# Altium schematic symbol library ECE362.SchLib: 24 symbols
Pins are listed as number, name and electrical type; pins without a type are passive.

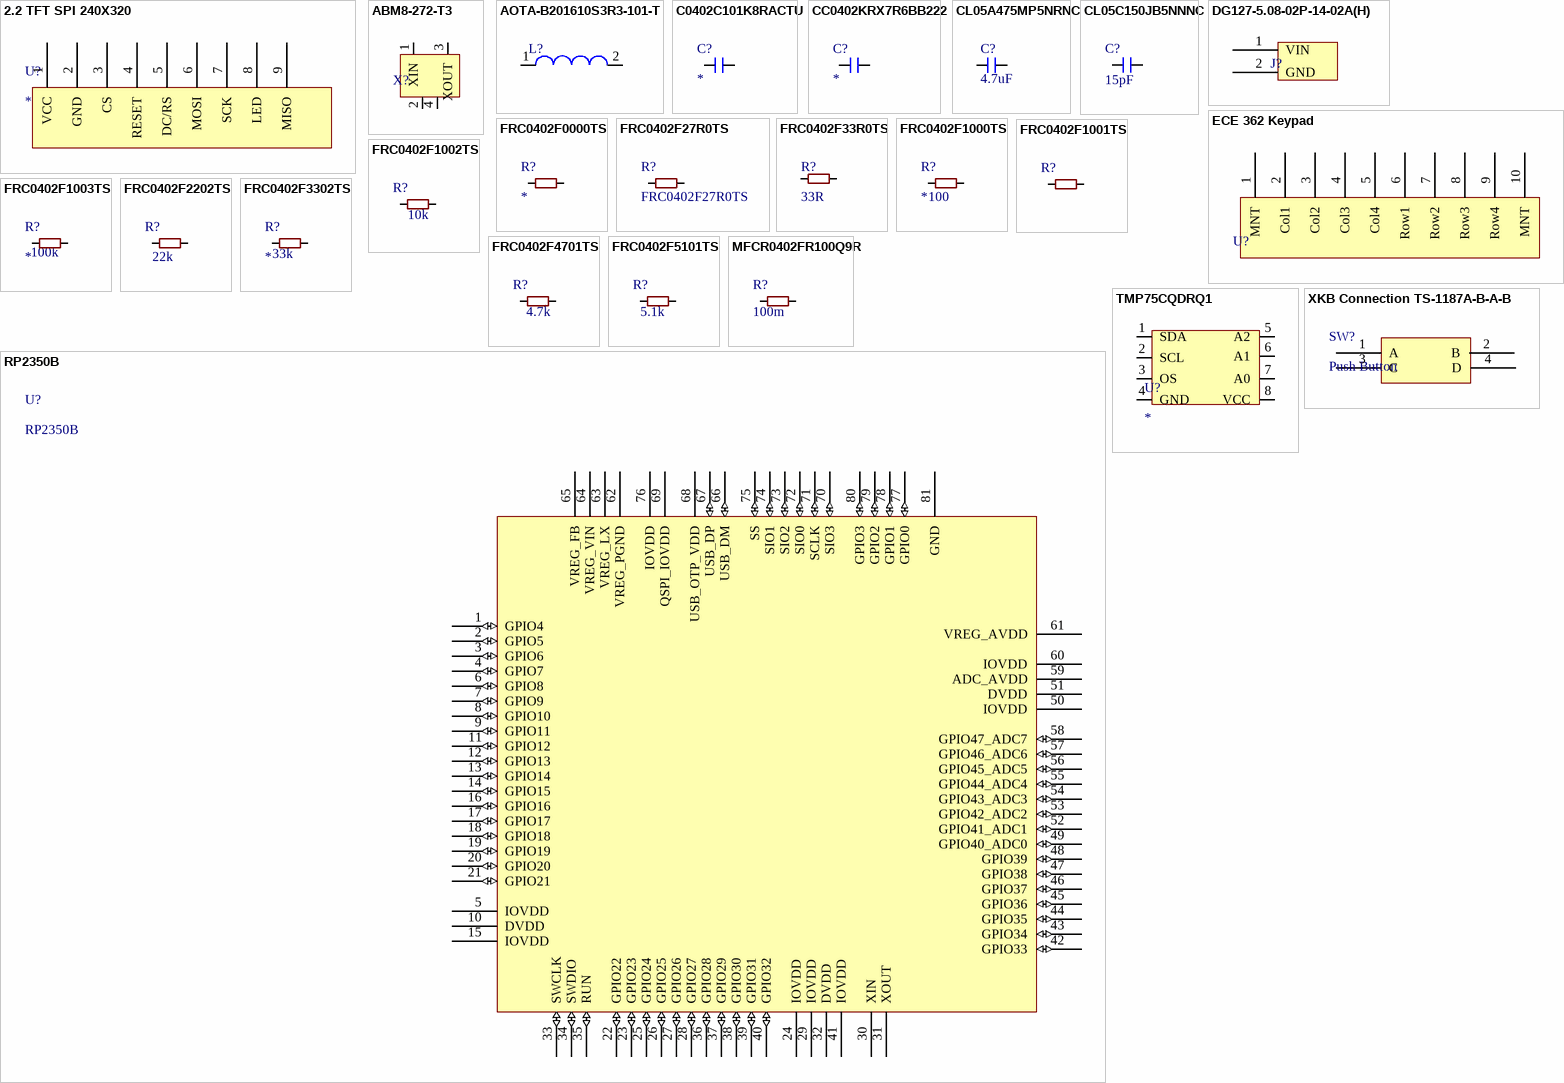
[diagram p0: symbols 2.2 TFT SPI 240X320 to XKB Connection TS-1187A-B-A-B]

## 2.2 TFT SPI 240X320
designator U?
2.2 inch TFT SPI Display; Datasheet: https://www.lcdwiki.com/2.2inch_SPI_Module_ILI9341_SKU:MSP2202#Reference_Materials
footprint TFT 2.2 LCD Display
pins: 1 VCC, 2 GND, 3 CS, 4 RESET, 5 DC/RS, 6 MOSI, 7 SCK, 8 LED, 9 MISO

## ABM8-272-T3
designator X?, comment 12MHz  (value not drawn)
Ultra Miniature Ceramic SMD Crystal, 12MHz, 50 Ohm ESR, +/- 30ppm tolerance, 10pF load capacitance, Recommended for RP2350B; ESR: 50R; Frequency: 12MHz; Tolerance: +/- 30ppm; Load Capacitance: 10pF; LCSC Part #: C20625731
footprint ABRACON ABM8-272-T3 (Ultra Miniature Ceramic SMD Crystal)
pins: 1 XIN, 2 GND, 3 XOUT, 4 GND

## AOTA-B201610S3R3-101-T
designator L?
3.3uH, 0806; Inductance: 3.3uH; LCSC Part #: C42411119; Datasheet: http://lcsc.com/product-detail/C42411119.html
footprint AOTA-B201610S3R3-101-T (3.3uH Inductor for the RP2350)
pins: 1, 2

## C0402C101K8RACTU
designator C?
100pF X7R ±10% 10V 0402 Ceramic Capacitors RoHS; C: 100pF; LCSC Part #: C22401043
footprint 0402 Resistor (0402 Thick Film)
pins: 1, 2

## CC0402KRX7R6BB222
designator C?
CAP CER 2.2nF 10V X7R 0402; C: 2.2nF; LCSC Part #: C541373
footprint 0402 Resistor (0402 Thick Film)
pins: 1, 2

## CL05A475MP5NRNC
designator C?, comment 4.7uF
CAP CER 4.7uF 10V X5R 0402; C: 4.7uF; LCSC Part #: C23733; Datasheet: https://www.lcsc.com/datasheet/C23733.pdf
footprint 0402 Resistor (0402 Thick Film)
pins: 1, 2

## CL05C150JB5NNNC
designator C?  C: 15pF  (hidden comment: *)
CAP CER 15pF 50V C0G 0402; LCSC Part #: C86285
footprint 0402 Resistor (0402 Thick Film)
pins: 1, 2

## DG127-5.08-02P-14-02A(H)
designator J?  (value not drawn)
TERM BLK 2POS 5.08mm TH; LCSC Part #: C691860
footprint DEGSON DG127-5.08-02P-14-02A(H)
pins: 1 VIN, 2 GND

## ECE 362 Keypad
designator U?  (value not drawn)
ECE 362 Keypad, cols are 6,7,8,9.
footprint ECE 362 Keypad
pins: 1 MNT, 2 Col1, 3 Col2, 4 Col3, 5 Col4, 6 Row1, 7 Row2, 8 Row3, 9 Row4, 10 MNT

## FRC0402F0000TS
designator R?
RES 0Ω ±1% 1/16W 0402; R: 0; LCSC Part #: C2906858
footprint 0402 Resistor (0402 Thick Film)
pins: 1, 2

## FRC0402F27R0TS
designator R?
RES 27Ω ±1% 62.5mW 0402; R: 27; LCSC Part #: C2909343
footprint 0402 Resistor (0402 Thick Film)
pins: 1, 2

## FRC0402F33R0TS
designator R?, comment 33R
RES 33Ω ±1% 62.5mW 0402; R: 33; Datasheet: https://www.lcsc.com/datasheet/C2906868.pdf; LCSC Part #: C2906868
footprint 0402 Resistor (0402 Thick Film)
pins: 1, 2

## FRC0402F1000TS
designator R?  R: 100
RES 100Ω ±1% 62.5mW 0402; LCSC Part #: C2906860
footprint 0402 Resistor (0402 Thick Film)
pins: 1, 2

## FRC0402F1001TS
designator R?
RES 1kΩ ±1% 62.5mW 0402; R: 1k; LCSC Part #: C2906864
footprint 0402 Resistor (0402 Thick Film)
pins: 1, 2

## FRC0402F1002TS
designator R?  R: 10k
RES 10kΩ ±1% 62.5mW 0402; LCSC Part #: C2906861
footprint 0402 Resistor (0402 Thick Film)
pins: 1, 2

## FRC0402F1003TS
designator R?  R: 100k
RES 100kΩ ±1% 62.5mW 0402; LCSC Part #: C2906859
footprint 0402 Resistor (0402 Thick Film)
pins: 1, 2

## FRC0402F2202TS
designator R?  R: 22k  (hidden comment: *)
RES 22kΩ ±1% 62.5mW 0402; LCSC Part #: C2909337
footprint 0402 Resistor (0402 Thick Film)
pins: 1, 2

## FRC0402F3302TS
designator R?  R: 33k
RES 33kΩ ±1% 62.5mW 0402; LCSC Part #: C2909350
footprint 0402 Resistor (0402 Thick Film)
pins: 1, 2

## FRC0402F4701TS
designator R?  R: 4.7k  (hidden comment: *)
RES 4.7kΩ ±1% 62.5mW 0402; LCSC Part #: C2906869
footprint 0402 Resistor (0402 Thick Film)
pins: 1, 2

## FRC0402F5101TS
designator R?  R: 5.1k  (hidden comment: *)
RES 5.1kΩ ±1% 62.5mW 0402; LCSC Part #: C2906874
footprint 0402 Resistor (0402 Thick Film)
pins: 1, 2

## MFCR0402FR100Q9R
designator R?  R: 100m  (hidden comment: *)
250mW 100mΩ Current Sense Resistor ±50ppm/℃ ±1% 0402 Chip Resistor - Surface Mount; LCSC Part #: C53447194
footprint 0402 Resistor (0402 Thick Film)
pins: 1, 2

## RP2350B
designator U?
RP2350B QFPN 80 pins; LCSC Part Number: C42415655; Manufacturer Part Number: RP2350B
footprint QFN-80
pins: 1 GPIO4 (io), 2 GPIO5 (io), 3 GPIO6 (io), 4 GPIO7 (io), 5 IOVDD (power), 6 GPIO8 (io), 7 GPIO9 (io), 8 GPIO10 (io), 9 GPIO11 (io), 10 DVDD (power), 11 GPIO12 (io), 12 GPIO13 (io), 13 GPIO14 (io), 14 GPIO15 (io), 15 IOVDD (power), 16 GPIO16 (io), 17 GPIO17 (io), 18 GPIO18 (io), 19 GPIO19 (io), 20 GPIO20 (io), 21 GPIO21 (io), 22 GPIO22 (io), 23 GPIO23 (io), 24 IOVDD (power), 25 GPIO24 (io), 26 GPIO25 (io), 27 GPIO26 (io), 28 GPIO27 (io), 29 IOVDD (power), 30 XIN, 31 XOUT, 32 DVDD (power), 33 SWCLK (io), 34 SWDIO (io), 35 RUN (io), 36 GPIO28 (io), 37 GPIO29 (io), 38 GPIO30 (io), 39 GPIO31 (io), 40 GPIO32 (io), 41 IOVDD (power), 42 GPIO33 (io), 43 GPIO34 (io), 44 GPIO35 (io), 45 GPIO36 (io), 46 GPIO37 (io), 47 GPIO38 (io), 48 GPIO39 (io), 49 GPIO40_ADC0 (io), 50 IOVDD (power), 51 DVDD (power), 52 GPIO41_ADC1 (io), 53 GPIO42_ADC2 (io), 54 GPIO43_ADC3 (io), 55 GPIO44_ADC4 (io), 56 GPIO45_ADC5 (io), 57 GPIO46_ADC6 (io), 58 GPIO47_ADC7 (io), 59 ADC_AVDD (power), 60 IOVDD (power), 61 VREG_AVDD (power), 62 VREG_PGND (power), 63 VREG_LX (power), 64 VREG_VIN (power), 65 VREG_FB (power), 66 USB_DM (io), 67 USB_DP (io), 68 USB_OTP_VDD (power), 69 QSPI_IOVDD (power), 70 SIO3 (io), 71 SCLK (io), 72 SIO0 (io), 73 SIO2 (io), 74 SIO1 (io), 75 SS (io), 76 IOVDD (power), 77 GPIO0 (io), 78 GPIO1 (io), 79 GPIO2 (io), 80 GPIO3 (io), 81 GND (power)

## TMP75CQDRQ1
designator U?
-40℃~+125℃ SMBus ±0.25℃ SOP-8 Analog and Digital Output; LCSC Part #: C55064299
footprint TMP75CQDRQ1 (-40℃~+125℃ SMBus ±0.25℃ SOP-8 Analog and Digital Output)
pins: 1 SDA, 2 SCL, 3 OS, 4 GND, 5 A2, 6 A1, 7 A0, 8 VCC

## XKB Connection TS-1187A-B-A-B
designator SW?, comment Push Button
SWITCH TACTILE SPST 160gf SMD; Manufacturer Part Number: TS-1187A-B-A-B; LCSC Part Number: C318884
footprint Push_Button (XKB Connection TS-1187A-B-A-B)
pins: 1 A (power), 2 B (power), 3 C (power), 4 D (power)